# Altium footprint library SS34-DO214.PcbLib: 1 footprints
Each footprint in its own frame and in the unit in brackets; x right, y up, seen from the top. Pads: shape width x height; smd on the part's side, far side on the other; paste and mask are expansions set on the pad; w line width, h text height; cw(c..) or ccw(c..) is an arc to the next point about the centre after c.
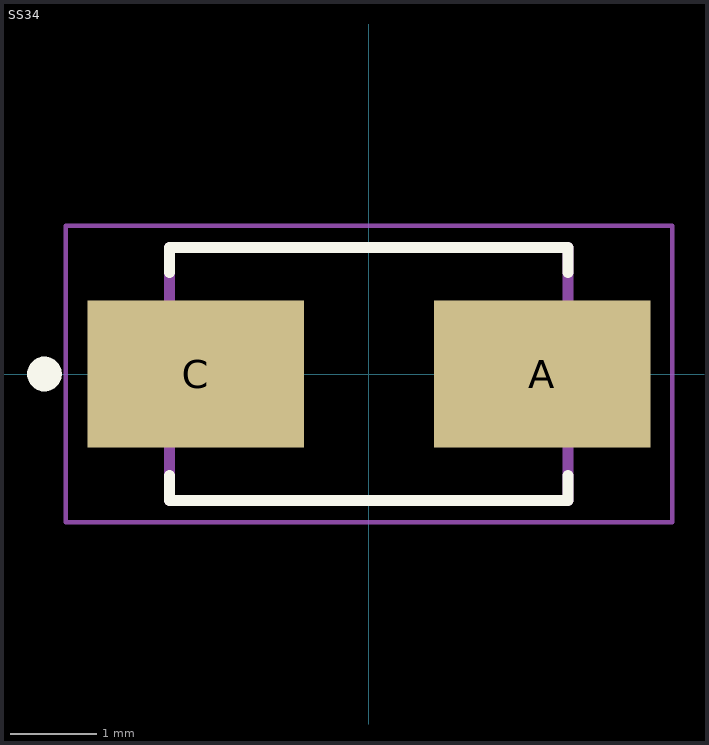
[diagram p0: the footprint, top view; thin cyan lines are the x and y axes]

## SS34 [mm] "DO-214"
pads (2):
  rect 2.5x1.7 smd: A(2,0) C(-2,0)
Top Overlay:
  circle w0.2: c-3.746,0 r0.1
  lines w0.127: -2.3,-1.173 -2.3,-1.46 2.3,-1.46 2.3,-1.173 ; -2.3,1.173 -2.3,1.46 2.3,1.46 2.3,1.173
Mechanical 13:
  lines w0.127: -2.3,-1.46 -2.3,1.46 2.3,1.46 2.3,-1.46 -2.3,-1.46
Mechanical 15:
  lines w0.05: -3.5,-1.71 3.5,-1.71 3.5,1.71 -3.5,1.71 -3.5,-1.71
3D body "SS34-DO214.STEP": height 2.4, standoff 0, extent -2.598,-1.302 2.598,1.302